# EAGLE library part FTR-J2AK012W (library FTR-J2AK012W)
Electromechanical Relay 12VDC 270Ohm 12A SPST-NO/SPST-NO(24x23.5x27)mm THT Voltage Relay Source: Datasheet
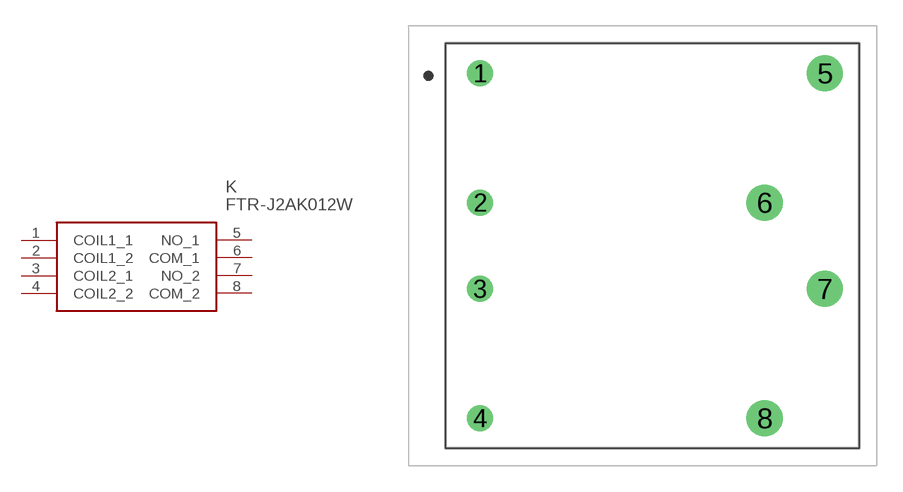
[diagram p0: symbol with the pads of FTRJ2AK012W; footprint FTRJ2AK012W]

Designator prefix K

## FTR-J2AK012W (Description: Electromechanical Relay 12VDC 270Ohm 12A SPST-NO/SPST-NO(24x23.5x27)mm THT Voltage Relay; Height: mm; Manufacturer_Name: FCL Components; Manufacturer_Part_Number: FTR-J2AK012W; Mouser_Part_Number: 817-FTR-J2AK012W; Mouser_Price-Stock: https://www.mouser.co.uk/ProductDetail/Fujitsu/FTR-J2AK012W?qs=EvTR%252B%2FkpER9cjG7hKs6Mbg%3D%3D)  [FTRJ2AK012W]
1  COIL1_1
2  COIL1_2
3  COIL2_1
4  COIL2_2
5  NO_1
6  COM_1
7  NO_2
8  COM_2

## Footprint FTRJ2AK012W (pad centres in mm)
FTR-J2AK012W-2-1
drill 1 pad 1.5: 1 0,0; 2 0,-7.5; 3 0,-12.5; 4 0,-20
drill 1.4 pad 2.1: 5 20,0; 6 16.5,-7.5; 7 20,-12.5; 8 16.5,-20